# Altium schematic symbol library Capacitors.SchLib: 5 symbols
Pins are listed as number, name and electrical type; pins without a type are passive.

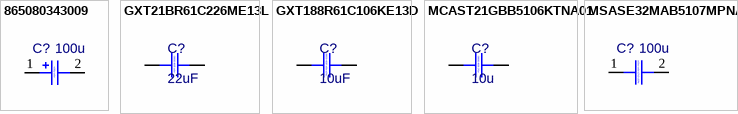
[diagram p0: symbols 865080343009 to MSASE32MAB5107MPNA01]

## 865080343009
designator C?, comment 100u
Capacitor Polarised Aluminium Electrolytic Capacitors - SMD WCAP-ASLI 100uF 16V 20% SMD/SMT; Manufacturer_Name: Wurth Elektronik; Manufacturer_Part_Number: 865080343009; Datasheet Link: https://www.we-online.com/catalog/datasheet/865080343009.pdf; Height: 5mm; Mouser Part Number: 710-865080343009; Mouser Price/Stock: https://www.mouser.co.uk/ProductDetail/Wurth-Elektronik/865080343009?qs=0KOYDY2FL28Gid9q%2FqirTQ%3D%3D
footprint 865080343009 (Width: 6.6 mm, Height: 5.5mm)
pins: 1 +, 2 -
text: 100u 16V

## GXT21BR61C226ME13L
designator C?, comment 22uF
Multilayer Ceramic Capacitors MLCC - SMD/SMT 0805 16VDC 22uF 20% X5R AEC-Q200; Manufacturer_Name: Murata Electronics; Manufacturer_Part_Number: GXT21BR61C226ME13L; Datasheet Link: https://www.mouser.de/datasheet/3/76/4/GXT21BR61C226ME13_01A.pdf
footprint CAP_0805s (Chip Capacitor, 2-Leads, Body 2,00x1,25mm, IPC Medium Density)
pins: 1, 2
text: 0805 X5R 16V

## GXT188R61C106KE13D
designator C?, comment 10uF
Multilayer Ceramic Capacitors MLCC - SMD/SMT 0603 16VDC 10uF 10% X5R AEC-Q200; Manufacturer_Name: Murata Electronics; Manufacturer_Part_Number: GXT188R61C106KE13D; Datasheet Link: TBA
footprint CAP_0603_L (generic, 0.1mm longer (max pad-to-pad) for better hand-solderability)
pins: 1, 2
text: 0603 X5R 16V 10%

## MCAST21GBB5106KTNA01
designator C?, comment 10u
Multilayer Ceramic Capacitors MLCC - SMD/SMT 25V 10uF X5R 0805 10%; Manufacturer_Name: TAIYO YUDEN; Manufacturer_Part_Number: MCAST21GBB5106KTNA01; Datasheet Link: https://www.mouser.com/catalog/specsheets/Taiyo%20Yuden_1102023_MC_mlcc_all_e.pdf
footprint CAP_0805s (Chip Capacitor, 2-Leads, Body 2,00x1,25mm, IPC Medium Density)
pins: 1, 2
text: 0805 X5R 25V

## MSASE32MAB5107MPNA01
designator C?, comment 100u
Multilayer Ceramic Capacitors MLCC - SMD/SMT 16V 100uF X5R 1210 20 %; Manufacturer_Name: TAIYO YUDEN; Manufacturer_Part_Number: MSASE32MAB5107MPNA01; Datasheet Link: https://www.mouser.com/catalog/specsheets/Tayio_Yuden_1102023_MS_mlcc_all_e.pdf?_gl=1*1rxg4sj*_gcl_aw*R0NMLjE3ODg0ODY5MTcuQ2p3S0NBand3SnpQQmhCUkVpd0FKZkhSblM5ekZUOGFxTzJkNFhkWjRHZDBxQk1uWEFQeTNmZmF0eVh2MzN0WXVpZGxzbWlweWtiRWR4b0NrX3NRQXZEX0J3RQ..*_gcl_au*MTk2MDIwMzcyMS4xNzg3MTYzOTg5LjE1NDU2MTg1LjE3ODgzMTM3ODEuMTc4ODMxMzc4Ny4zOTIwMDAxODQuMTc4ODMxMzc4MS4xNzg4MzEzNzg3*_ga*NTU1NDc1MzkuMTc2MzAwODA1OQ..*_ga_15W4STQT4T*czE3ODg4NzY3NDUkbzIxNiRnMCR0MTc4ODg3ODI1NSRqNjAkbDAkaDA.; Height: 2.5mm; Mouser Part Number: 963-MSASE32MAB5107MP; Mouser Price/Stock: https://www.mouser.co.uk/ProductDetail/Wurth-Elektronik/865080343009?qs=0KOYDY2FL28Gid9q%2FqirTQ%3D%3D
footprint CAP_1210 (Chip Capacitor, 2-Leads, Body 3,20x2,5mm, IPC Medium Density)
pins: 1 +, 2 -
text: 100u 16V 1210 20%